# Altium integrated library PAW3395DM-T6QU.IntLib: 1 symbol
Pins are listed as number, name and electrical type; pins without a type are passive.

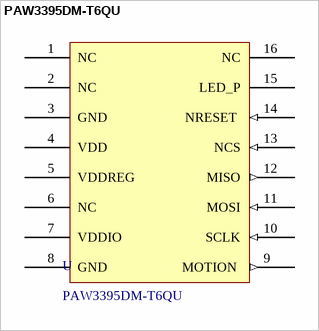
[diagram p0: symbol PAW3395DM-T6QU]

## PAW3395DM-T6QU
designator U
PixArt PAW3395DM-T6QU optical navigation sensor, 16-pin molded lead-frame DIP, 1.78mm pitch staggered dual row, 10.7mm row spacing, through-hole
footprint PAW3395DM-T6QU (PixArt PAW3395DM-T6QU optical navigation sensor, 16-pin molded lead-frame DIP, 1.78mm pitch staggered dual row, 10.7mm row spacing, through-hole)
pins: 1 NC, 2 NC, 3 GND (power), 4 VDD (power) "1.8-2.1v power input", 5 VDDREG (power) "output of the chip's internal digital-core regulator", 6 NC, 7 VDDIO (power) "3.3v sets the logic level for SPI", 8 GND (power) "Ground", 9 MOTION  (out) "I have new movement data", 10 SCLK (in) "clock, MCU drives", 11 MOSI (in) "commands and register writes", 12 MISO (out) "register reads and the motion burs", 13 NCS (in) "chip select, active low", 14 NRESET  (in) "hardware reset, active low", 15 LED_P "anode of the IR LED", 16 NC